# Altium footprint library Connector_RF.PcbLib: 2 footprints
Each footprint in its own frame and in the unit in brackets; x right, y up, seen from the top. Pads: shape width x height; smd on the part's side, far side on the other; paste and mask are expansions set on the pad; w line width, h text height; cw(c..) or ccw(c..) is an arc to the next point about the centre after c.
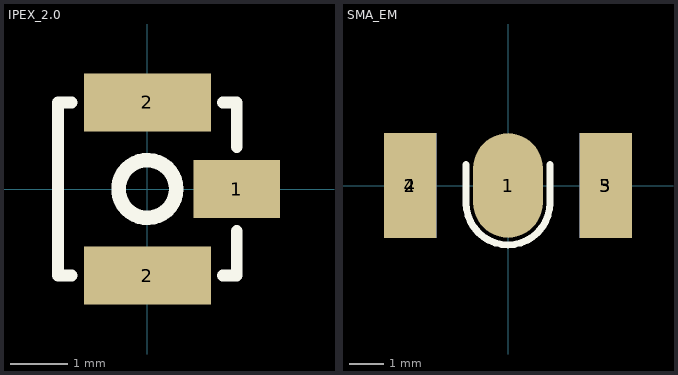
[diagram p0: the footprints below, top view; thin cyan lines are the x and y axes]

## IPEX_2.0 [mm]
pads (3):
  rect 1.5x1 smd: 1(1.55,0)
  rect 2.2x1 smd: 2(0,-1.5) 2(0,1.5)
Top Overlay:
  circle w0.254: c0,0 r0.5
  lines w0.203: -1.309,-1.5 -1.55,-1.5 -1.55,1.5 -1.309,1.5 ; 1.309,-1.5 1.55,-1.5 1.55,-0.729 ; 1.309,1.5 1.55,1.5 1.55,0.729
Top Designator (Mech4):
  text ".Designator" at -3.335,-0.344 h1.52
3D body "ipex_pcb_4pin.step": height 1.25, standoff 0, extent -1.55,-1.5 1.55,1.5

## SMA_EM [mm] "SMA-J-P-H-ST-EM1 edge mounting"
pads (5):
  oval 2x3 smd: 1(0,0)
  rect 1.5x3 smd: 2(-2.8,0) 3(2.8,0)
  rect 1.5x3 smd far side: 4(-2.8,0) 5(2.8,0)
Top Overlay:
  lines w0.2: -1.2,0.6 -1.2,-0.5 ccw(c0,-0.5) 1.2,-0.5 1.2,0.6
Top Designator (Mech4):
  text ".Designator" at -3.71,4.871 h1.52
Mechanical 15:
  text ".Designator" at -3.898,0.302 h1.6
3D body "SMA-J-P-H-ST-EM1.STEP": height 3.51, standoff -2.84, extent -3.175,-1.1 3.175,12.23